# Altium schematic symbol library Centralize.SchLib: 1081 symbols (part 3 of 26)
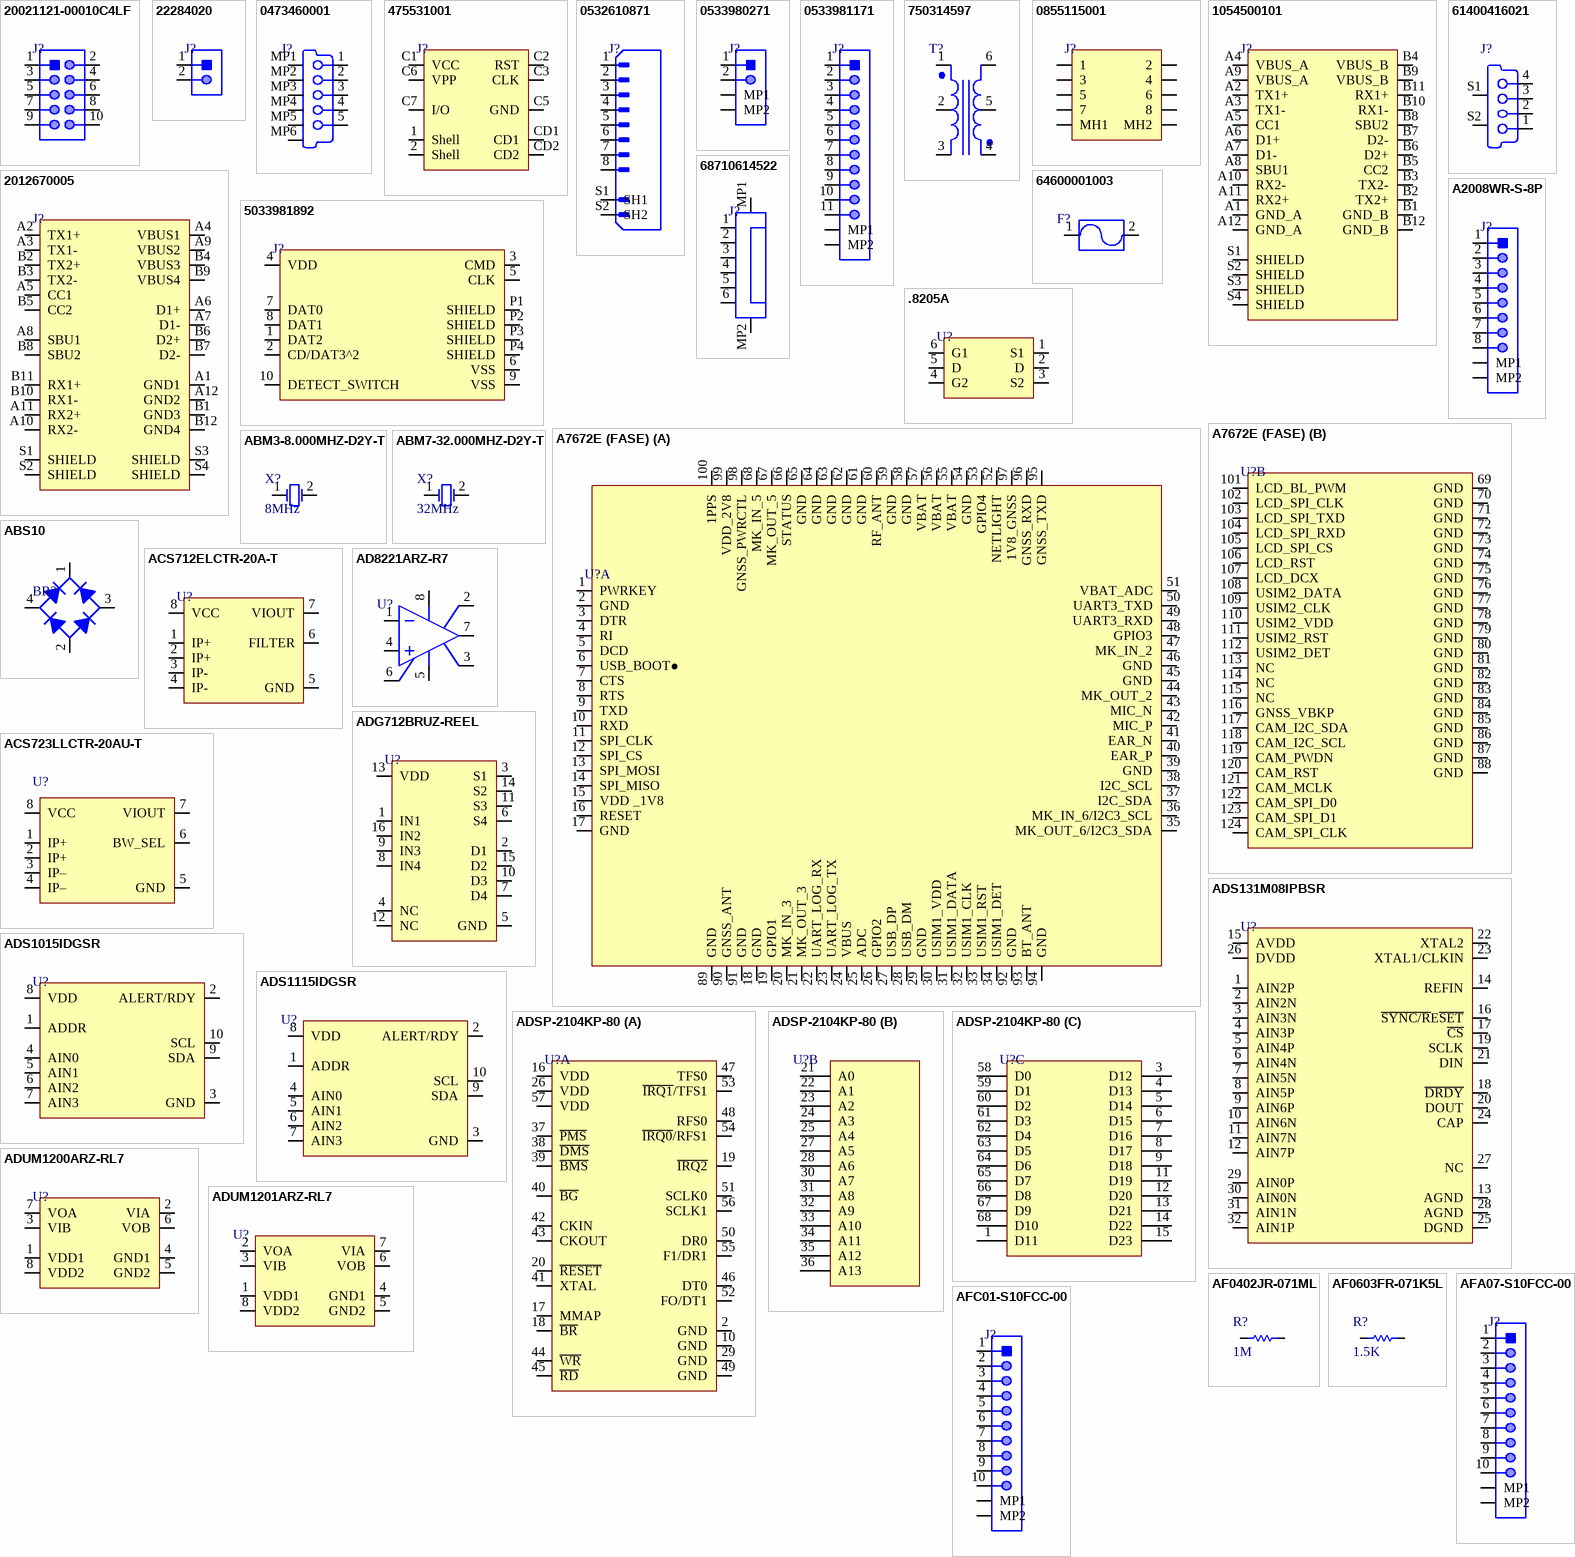
[diagram p49: symbols 20021121-00010C4LF to AFC01-S10FCC-00]

## 750314597
designator T?
XFRMR ISOL BUCK DC/DC CONV SMD; Manufacturer: Wurth Electronics Midcom; Manufacturer Part Number: 750314597; Frequency: 150kHz; Item Type: Transformer; Supplier 1: Digi-Key; RoHS: Yes; Category: Power Supply Modules; Stock 1: 1132; Pricing 1: 1=3.57000, 10=3.30600, 50=3.00500, 100=2.73200 (USD); Mount: Surface Mount; Min Operating Temperature: -40°C; Max Operating Temperature: 125°C; Packaging: Tape and Reel; RoHS Compliant: No; ComponentLink1URL: http://www.mouser.com/ds/2/445/750314597-773587.pdf?src-supplier=Mouser; ComponentLink1Description: http://www.mouser.com/ds/2/445/750314597-773587.pdf?src-supplier=Mouser; ComponentLink2URL: https://katalog.we-online.de/ctm/datasheet/750314597.pdf?src-supplier=Digi-Key; ComponentLink2Description: https://katalog.we-online.de/ctm/datasheet/750314597.pdf?src-supplier=Digi-Key; Supplier Part Number 1: 1297-1165-1-ND
footprint 750314597.
pins: 1 PRI_1, 2 NC, 3 PRI_2, 4 SEC_1, 5 NC, 6 SEC_2

## 0855115001
designator J?
CONN MOD JACK 8P8C VERT UNSHLD; Manufacturer: Molex; Manufacturer Part Number: 85511-5001; Number of Ports: 1; Gender: Female; Current Rating: 1.5A; Shielding: Unshielded; Voltage Rating: 125V; Number of Contacts: 8; Connector Type: PCB; Pitch: 2.54mm; Item Type: Ethernet Connector; Supplier 1: Mouser; RoHS: Yes; Category: Modular / Ethernet Connectors; Stock 1: 2609; Pricing 1: 1=2.18, 10=1.62, 50=1.62, 100=1.56, 1000=1.37, 10000=1.36 (USD); Mounting Technology: Through Hole; Contact Plating: Gold; Contact Material: Bronze; Housing Material: Thermoplastic; Min Operating Temperature: -40°C; Max Operating Temperature: 80°C; Packaging: Tray; Orientation: Straight; Package Quantity: 2618; Termination: Through Hole; Number of Positions: 8; Series: 85511; Radiation Hardening: No; RoHS Compliant: Yes; Reach SVHC Compliant: Unknown; ComponentLink1URL: https://datasheet.ciiva.com/8042/1598510-8042692.pdf?src-supplier=Element14; ComponentLink1Description: https://datasheet.ciiva.com/8042/1598510-8042692.pdf?src-supplier=Element14; ComponentLink2URL: https://datasheet.ciiva.com/34305/0855115001-modular-jacks-plug-34305578.pdf?src-supplier=Onlinecomponents.com; ComponentLink2Description: https://datasheet.ciiva.com/34305/0855115001-modular-jacks-plug-34305578.pdf?src-supplier=Onlinecomponents.com; ComponentLink3URL: https://datasheet.ciiva.com/4562/0855115001-modular-jacks-plug-175812-4562506.pdf?src-supplier=Mouser; ComponentLink3Description: https://datasheet.ciiva.com/4562/0855115001-modular-jacks-plug-175812-4562506.pdf?src-supplier=Mouser; ComponentLink4URL: https://datasheet.ciiva.com/9392/0855115001-modular-jacks-plug-9392966.pdf?src-supplier=Avnet; ComponentLink4Description: https://datasheet.ciiva.com/9392/0855115001-modular-jacks-plug-9392966.pdf?src-supplier=Avnet; Supplier Part Number 1: 538-85511-5001
footprint 0855115001
pins: 1, 2, 3, 4, 5, 6, 7, 8, MH1, MH2

## 1054500101
designator J?
CONN RCP USB3.1 TYPEC 24P SMD RA; Manufacturer: Molex; Manufacturer Part Number: 105450-0101; Item Type: USB Connector; Supplier 1: Arrow Electronics; RoHS: Yes; Category: USB Connectors; Stock 1: 1720; Pricing 1: 1=2.36000, 10=1.98100, 25=1.94300, 100=1.88000, 250=1.81800, 500=1.75500, 1000=1.69300 (USD); ComponentLink1URL: http://www.farnell.com/datasheets/2801634.pdf?src-supplier=Farnell; ComponentLink1Description: http://www.farnell.com/datasheets/2801634.pdf?src-supplier=Farnell; ComponentLink2URL: http://www.farnell.com/datasheets/2672741.pdf?src-supplier=Newark; ComponentLink2Description: http://www.farnell.com/datasheets/2672741.pdf?src-supplier=Newark; ComponentLink3URL: https://www.molex.com/pdm_docs/ps/PS-105448-001.pdf?src-supplier=Digi-Key; ComponentLink3Description: https://www.molex.com/pdm_docs/ps/PS-105448-001.pdf?src-supplier=Digi-Key; ComponentLink4URL: https://www.molex.com/pdm_docs/sd/1054500101_sd.pdf?src-supplier=Digi-Key; ComponentLink4Description: https://www.molex.com/pdm_docs/sd/1054500101_sd.pdf?src-supplier=Digi-Key; ComponentLink5URL: http://www.literature.molex.com/SQLImages/kelmscott/Molex/PDF_Images/987651-4081.PDF?src-supplier=Avnet; ComponentLink5Description: http://www.literature.molex.com/SQLImages/kelmscott/Molex/PDF_Images/987651-4081.PDF?src-supplier=Avnet; ComponentLink6URL: http://www.farnell.com/datasheets/2801634.pdf?src-supplier=Newark; ComponentLink6Description: http://www.farnell.com/datasheets/2801634.pdf?src-supplier=Newark; ComponentLink7URL: http://www.farnell.com/datasheets/2801634.pdf?src-supplier=Element14; ComponentLink7Description: http://www.farnell.com/datasheets/2801634.pdf?src-supplier=Element14; ComponentLink8URL: http://www.farnell.com/datasheets/2015275.pdf?src-supplier=Element14; ComponentLink8Description: http://www.farnell.com/datasheets/2015275.pdf?src-supplier=Element14; Supplier Part Number 1: 105450-0101; LCSC Part Number: C134092
footprint 1054500101_
pins: A1 GND_A, A2 TX1+, A3 TX1-, A4 VBUS_A, A5 CC1, A6 D1+, A7 D1-, A8 SBU1, A9 VBUS_A, A10 RX2-, A11 RX2+, A12 GND_A, B1 GND_B, B2 TX2+, B3 TX2-, B4 VBUS_B, B5 CC2, B6 D2+, B7 D2-, B8 SBU2, B9 VBUS_B, B10 RX1-, B11 RX1+, B12 GND_B, S1 SHIELD, S2 SHIELD, S3 SHIELD, S4 SHIELD

## 2012670005
designator J?
CONN RCP USB3.1 TYPEC 24P SMD RA; Manufacturer: Molex; Manufacturer Part Number: 2012670005; Item Type: USB C Connector; Supplier 1: RSComponents; RoHS: Yes; Category: Uncategorized; Stock 1: 1525; Pricing 1: 50=2.06600, 125=1.93000, 250=1.81600, 500=1.70800 (GBP); ComponentLink1URL: https://www.molex.com/pdm_docs/sd/2012670005_sd.pdf?src-supplier=Digi-Key; ComponentLink1Description: https://www.molex.com/pdm_docs/sd/2012670005_sd.pdf?src-supplier=Digi-Key; Supplier Part Number 1: 1768676P; ComponentLink2Description: LCSC; ComponentLink2URL: https://www.lcsc.com/product-detail/USB-Connectors_MOLEX-2012670005_C565324.html; LCSC Part Number: C565324
footprint 2012670005
pins: A1 GND1 (power), A2 TX1+, A3 TX1-, A4 VBUS1 (power), A5 CC1, A6 D1+, A7 D1-, A8 SBU1, A9 VBUS2 (power), A10 RX2-, A11 RX2+, A12 GND2 (power), B1 GND3 (power), B2 TX2+, B3 TX2-, B4 VBUS3 (power), B5 CC2, B6 D2+, B7 D2-, B8 SBU2, B9 VBUS4 (power), B10 RX1-, B11 RX1+, B12 GND4 (power), S1 SHIELD (power), S2 SHIELD (power), S3 SHIELD (power), S4 SHIELD (power)

## 5033981892
designator J?
MICRO SD PUSH/PUSH SMALL 8C; Manufacturer: Molex; Manufacturer Part Number: 503398-1892; Item Type: SD Card Connector; Supplier 1: Arrow Electronics; RoHS: Yes; Category: Memory Connectors; Stock 1: 14535; Pricing 1: 1=2.47900, 10=2.18900, 25=2.17400, 100=1.81200 (USD); ComponentLink1URL: https://datasheet.ciiva.com/29723/5033981892-sd-29723401.pdf?src-supplier=Digi-Key; ComponentLink1Description: https://datasheet.ciiva.com/29723/5033981892-sd-29723401.pdf?src-supplier=Digi-Key; ComponentLink2URL: https://datasheet.ciiva.com/22744/1740946-22744573.pdf?src-supplier=Element14; ComponentLink2Description: https://datasheet.ciiva.com/22744/1740946-22744573.pdf?src-supplier=Element14; ComponentLink3URL: https://datasheet.ciiva.com/23941/1740947-23941665.pdf?src-supplier=Newark; ComponentLink3Description: https://datasheet.ciiva.com/23941/1740947-23941665.pdf?src-supplier=Newark; Supplier Part Number 1: 503398-1892; LCSC Part Number: C428492
footprint 5033981892_
pins: 1 DAT2, 2 CD/DAT3^2, 3 CMD, 4 VDD, 5 CLK, 6 VSS, 7 DAT0, 8 DAT1, 9 VSS, 10 DETECT_SWITCH, P1 SHIELD, P2 SHIELD, P3 SHIELD, P4 SHIELD

## 61400416021
designator J?
CONN RCPT USB2.0 TYPEA 4POS R/A; Manufacturer: Wurth Electronics; Manufacturer Part Number: 61400416021; Gender: Receptacle; Connector Type: USB; Number of Contacts: 4; Current Rating: 1A; Voltage Rating: 30V; Number of Ports: 1; Insulation Resistance: 1GR; Item Type: Connector; Supplier 1: Digi-Key; Stock 1: 7748; Pricing 1: 1=0.99, 10=0.874, 50=0.823, 100=0.739, 250=0.672 (USD); Mount: Through Hole,Horizontal; Contact Plating: Gold; Contact Material: Copper Alloy; Color: White; Min Operating Temperature: -40°C; Max Operating Temperature: 105°C; Packaging: Tray; Package Quantity: 60; Series: WR-COM; Number of Positions: 4; Termination: Solder; Orientation: Right Angle; USB Standard: USB 2.0; Length: 15.8mm; Width: 14.4mm; REACH SVHC: Unknown; Lead Free: Lead Free; Flammability Rating: UL94 V-0; ComponentLink1URL: https://www.distrelec.biz/Web/Downloads/he/et/4257096_eng_datasheet.pdf?mime=application%2Fpdf&src-supplier=Distrelec; ComponentLink1Description: https://www.distrelec.biz/Web/Downloads/he/et/4257096_eng_datasheet.pdf?mime=application%2Fpdf&src-supplier=Distrelec; ComponentLink2URL: http://www.farnell.com/datasheets/1712150.pdf?src-supplier=Element14; ComponentLink2Description: http://www.farnell.com/datasheets/1712150.pdf?src-supplier=Element14; ComponentLink3URL: http://www.farnell.com/datasheets/1712150.pdf?src-supplier=Newark; ComponentLink3Description: http://www.farnell.com/datasheets/1712150.pdf?src-supplier=Newark; ComponentLink4URL: http://katalog.we-online.de/kataloge/eican/media/pdf/61400416021.pdf?src-supplier=Mouser; ComponentLink4Description: http://katalog.we-online.de/kataloge/eican/media/pdf/61400416021.pdf?src-supplier=Mouser; ComponentLink5URL: https://katalog.we-online.de/em/datasheet/61400416021.pdf?src-supplier=Digi-Key; ComponentLink5Description: https://katalog.we-online.de/em/datasheet/61400416021.pdf?src-supplier=Digi-Key; ComponentLink6URL: http://documents.rs-components.com/techlib://itc_doclist_GB.htm?stockno=7480863&src-supplier=RSComponents; ComponentLink6Description: http://documents.rs-components.com/techlib://itc_doclist_GB.htm?stockno=7480863&src-supplier=RSComponents; ComponentLink7URL: http://www.produktinfo.conrad.com/datenblaetter/1000000-1099999/001088207-da-01-en-WR_COM_USB_TYP_A__61400416021.pdf?src-supplier=Conrad; ComponentLink7Description: http://www.produktinfo.conrad.com/datenblaetter/1000000-1099999/001088207-da-01-en-WR_COM_USB_TYP_A__61400416021.pdf?src-supplier=Conrad; Supplier Part Number 1: 732-2106-ND
footprint 61400416021_
pins: 1 V BUS (5V) "USB Vcc [Red]", 2 D- "USB Data - [White]", 3 D+ "USB Data + [Green]", 4 NC "Not Connected (or joined to pin 5 via resistor)", S1 Shield "Shell", S2 Shield "Shell"

## 64600001003
designator F?
FUSE BLOCK CART 250V 6.3A PCB; Manufacturer: Littelfuse Wickmann; Manufacturer Part Number: 64600001003; Color: Black; Material: Tin; Body Material: Polyamide; Number of Poles: 1; Illumination Type: Illuminated; Fuse Size: 0.197 Dia x 0.787 L (5mm x 20mm); Item Type: Fuse holder; Supplier 1: Future Electronics; RoHS: Yes; Category: Fuse Holders; Stock 1: 9600; Pricing 1: 100=0.45500, 400=0.43500, 1500=0.41500, 3000=0.41000, 7500=0.39000 (USD); Mount: Through Hole; Number of Pins: 2; Contact Material: Copper Alloy; Contact Plating: Tin; Min Operating Temperature: -25°C; Max Operating Temperature: 70°C; Voltage Rating (DC): 250V; Voltage Rating (AC): 250V; Current Rating: 6.3A; Package Quantity: 1000; Voltage Rating: 250V; Packaging: Bulk; Number of Circuits: 1; Termination: PC Pin; Voltage: 250V; Fuse Current: 6.3A; Series: 646; Orientation: Horizontal; Length: 25.8mm; Width: 12mm; Depth: 5.5mm; Lead Free: Lead Free; Flammability Rating: UL94 V-1; ComponentLink1URL: https://datasheet.ciiva.com/25620/0900766b81196eda-25620105.pdf?src-supplier=Rs; ComponentLink1Description: https://datasheet.ciiva.com/25620/0900766b81196eda-25620105.pdf?src-supplier=Rs; ComponentLink2URL: https://datasheet.ciiva.com/14119/gqlittelfuse-sicherungshalter-646-en-14119833.pdf?src-supplier=Distrelec; ComponentLink2Description: https://datasheet.ciiva.com/14119/gqlittelfuse-sicherungshalter-646-en-14119833.pdf?src-supplier=Distrelec; ComponentLink3URL: https://datasheet.ciiva.com/23593/43388-23593468.pdf?src-supplier=Newark; ComponentLink3Description: https://datasheet.ciiva.com/23593/43388-23593468.pdf?src-supplier=Newark; ComponentLink4URL: https://datasheet.ciiva.com/1270/1480080-1270114.pdf?src-supplier=Element14; ComponentLink4Description: https://datasheet.ciiva.com/1270/1480080-1270114.pdf?src-supplier=Element14; ComponentLink5URL: https://datasheet.ciiva.com/4480/646-648-640-lf-050901-4480295.pdf?src-supplier=Mouser; ComponentLink5Description: https://datasheet.ciiva.com/4480/646-648-640-lf-050901-4480295.pdf?src-supplier=Mouser; ComponentLink6URL: https://datasheet.ciiva.com/15187/getdatasheetpartid-57320-15187869.pdf?src-supplier=Verical; ComponentLink6Description: https://datasheet.ciiva.com/15187/getdatasheetpartid-57320-15187869.pdf?src-supplier=Verical; ComponentLink7URL: https://datasheet.ciiva.com/7660/646-648-640-lf-050901-7660727.pdf?src-supplier=Element14; ComponentLink7Description: https://datasheet.ciiva.com/7660/646-648-640-lf-050901-7660727.pdf?src-supplier=Element14; ComponentLink8URL: https://datasheet.ciiva.com/295/646-648-640-lf-050901-295754.pdf?src-supplier=Digi-Key; ComponentLink8Description: https://datasheet.ciiva.com/295/646-648-640-lf-050901-295754.pdf?src-supplier=Digi-Key; LCSC Part Number: C206887; ComponentLink9Description: LCSC; ComponentLink9URL: https://www.lcsc.com/product-detail/Fuse-Holders_Littelfuse-64600001003_C206887.html
footprint 64600001003
pins: 1, 2

## 68710614522
designator J?
CONN FPC BOTTOM 6POS 0.5MM R/A; Manufacturer: Wurth Electronics; Manufacturer Part Number: 68710614522; Actuator Material: Polymer,Liquid Crystal Polymer; Actuator Color: Black; Current Rating: 500mA; Voltage Rating: 50V; Number of Positions: 6; Insulation Resistance: 100MR; Gender: Male; Mating Cycles: 25; Item Type: FPC Connector; Supplier 1: Rs; RoHS: Yes; Category: FFC / FPC; Stock 1: 375; Pricing 1: 50=0.14160, 250=0.65600, 500=0.57200, 1250=0.51800 (GBP); Mounting Technology: Surface Mount; Contact Plating: Tin; Contact Material: Bronze,Tin; Housing Material: Liquid Crystal Polymer; Housing Color: Beige; Min Operating Temperature: -25°C; Max Operating Temperature: 85°C; Number of Rows: 1; Package Quantity: 1; Packaging: Tape and Reel; Termination: SMD/SMT; Contact Location: Bottom; Number of Contacts: 6; Orientation: Straight; Series: WR-FPC; Length: 9.4mm; Width: 2.1mm; Pitch: 0.5mm; Flammability Rating: UL94 V-0; RoHS Compliant: Yes; ComponentLink1URL: https://datasheet.ciiva.com/7662/6871xx14522-7662619.pdf?src-supplier=Element14; ComponentLink1Description: https://datasheet.ciiva.com/7662/6871xx14522-7662619.pdf?src-supplier=Element14; ComponentLink2URL: https://datasheet.ciiva.com/13698/6871xx14522-321403-13698860.pdf?src-supplier=Mouser; ComponentLink2Description: https://datasheet.ciiva.com/13698/6871xx14522-321403-13698860.pdf?src-supplier=Mouser; ComponentLink3URL: https://datasheet.ciiva.com/670/6871xx14522-670518.pdf?src-supplier=Digi-Key; ComponentLink3Description: https://datasheet.ciiva.com/670/6871xx14522-670518.pdf?src-supplier=Digi-Key; ComponentLink4URL: https://datasheet.ciiva.com/670/6871xx14522-670517.pdf?src-supplier=Digi-Key; ComponentLink4Description: https://datasheet.ciiva.com/670/6871xx14522-670517.pdf?src-supplier=Digi-Key; ComponentLink5URL: https://datasheet.ciiva.com/670/6871xx14522-670519.pdf?src-supplier=Digi-Key; ComponentLink5Description: https://datasheet.ciiva.com/670/6871xx14522-670519.pdf?src-supplier=Digi-Key; ComponentLink6URL: https://datasheet.ciiva.com/14153/6871xx14522-eng-datasheet-14153885.pdf?src-supplier=Distrelec; ComponentLink6Description: https://datasheet.ciiva.com/14153/6871xx14522-eng-datasheet-14153885.pdf?src-supplier=Distrelec; Supplier Part Number 1: 7632613P
footprint 68710614522
pins: 1, 2, 3, 4, 5, 6, MP1, MP2

## .8205A
designator U?
20V 6A 22mΩ@4.5V,4.5A 2W 2PCSNChannel(Common Drain) SOT-23-6 MOSFETs ROHS; Manufacturer: Shenzhen Fuman Elec; Manufacturer Part Number: .8205A; Item Type: IC; ComponentLink1Description: LCSC; ComponentLink1URL: https://www.lcsc.com/product-detail/MOSFETs_Shenzhen-Fuman-Elec-8205A_C841290.html; Package: SOT-23-6; LCSC Part Number: C841290
footprint SOT-23-6
pins: 1 S1, 2 D, 3 S2, 4 G2, 5 D, 6 G1

## A2008WR-S-8P
designator J?
1x8P PH 1 2mm 8 Brass SMD,P=2mm Wire To Board / Wire To Wire Connector ROHS; Manufacturer: CJT; Manufacturer Part Number: A2008WR-S-8P; Package: SMD,P=2mm; LCSC Part Number: C273136; Item Type: Wire To Wire Connector; ComponentLink1Description: LCSC; ComponentLink1URL: https://www.lcsc.com/product-detail/_Changjiang-Connectors-A2008WR-S-8P_C273136.html
footprint A2008WR-S-8P
pins: 1, 2, 3, 4, 5, 6, 7, 8, MP1, MP2

## A7672E (FASE)
designator U?
RF TXRX MODULE CELLULAR SMD; Manufacturer: SIMCom Wireless Solutions Limited; Manufacturer Part Number: A7672E (FASE); Item Type: IC Module; Package: 80-SMD Module; ComponentLink1Description: Digikey; ComponentLink1URL: https://www.digikey.com/en/products/detail/simcom-wireless-solutions-limited/A7672E-FASE/15841437
footprint A7672E (FASE)
part A pins: 1 PWRKEY, 2 GND, 3 DTR, 4 RI, 5 DCD, 6 USB_BOOT●, 7 CTS, 8 RTS, 9 TXD, 10 RXD, 11 SPI_CLK, 12 SPI_CS, 13 SPI_MOSI, 14 SPI_MISO, 15 VDD _1V8, 16 RESET, 17 GND, 18 GND, 19 GPIO1, 20 MK_IN_3, 21 MK_OUT_3, 22 UART_LOG_RX, 23 UART_LOG_TX, 24 VBUS, 25 ADC, 26 GPIO2, 27 USB_DP, 28 USB_DM, 29 GND, 30 USIM1_VDD, 31 USIM1_DATA, 32 USIM1_CLK, 33 USIM1_RST, 34 USIM1_DET, 35 MK_OUT_6/I2C3_SDA, 36 MK_IN_6/I2C3_SCL, 37 I2C_SDA, 38 I2C_SCL, 39 GND, 40 EAR_P, 41 EAR_N, 42 MIC_P, 43 MIC_N, 44 MK_OUT_2, 45 GND, 46 GND, 47 MK_IN_2, 48 GPIO3, 49 UART3_RXD, 50 UART3_TXD, 51 VBAT_ADC, 52 NETLIGHT, 53 GPIO4, 54 GND, 55 VBAT, 56 VBAT, 57 VBAT, 58 GND, 59 GND, 60 RF_ANT, 61 GND, 62 GND, 63 GND, 64 GND, 65 GND, 66 STATUS, 67 MK_OUT_5, 68 MK_IN_5, 89 GND, 90 GNSS_ANT, 91 GND, 92 GND, 93 BT_ANT, 94 GND, 95 GNSS_TXD, 96 GNSS_RXD, 97 1V8_GNSS, 98 GNSS_PWRCTL, 99 VDD_2V8, 100 1PPS
part B pins: 69 GND, 70 GND, 71 GND, 72 GND, 73 GND, 74 GND, 75 GND, 76 GND, 77 GND, 78 GND, 79 GND, 80 GND, 81 GND, 82 GND, 83 GND, 84 GND, 85 GND, 86 GND, 87 GND, 88 GND, 101 LCD_BL_PWM, 102 LCD_SPI_CLK, 103 LCD_SPI_TXD, 104 LCD_SPI_RXD, 105 LCD_SPI_CS, 106 LCD_RST, 107 LCD_DCX, 108 USIM2_DATA, 109 USIM2_CLK, 110 USIM2_VDD, 111 USIM2_RST, 112 USIM2_DET, 113 NC, 114 NC, 115 NC, 116 GNSS_VBKP, 117 CAM_I2C_SDA, 118 CAM_I2C_SCL, 119 CAM_PWDN, 120 CAM_RST, 121 CAM_MCLK, 122 CAM_SPI_D0, 123 CAM_SPI_D1, 124 CAM_SPI_CLK

## ABM3-8.000MHZ-D2Y-T
designator X?, comment 8MHz
5032 2-SMD 8MHz 18pF ±20ppm -40°C~85°C; Manufacturer: Abracon; Manufacturer Part Number: ABM3-8.000MHZ-D2Y-T; ESR (Equivalent Series Resistance): 140R; Frequency Stability: 30ppm; ESR: 500R; Item Type: Crystal; Supplier 1: Future Electronics; RoHS: Yes; Category: Crystals; Stock 1: 294000; Pricing 1: 1000=0.36500, 2000=0.35500, 3000=0.35000, 4000=0.34500, 5000=0.33500 (USD); Mounting Technology: Surface Mount; Case/Package: SMD/SMT; Pins: 2; Min Operating Temperature: -40°C; Max Operating Temperature: 85°C; Frequency: 8MHz; Tolerance: 20ppm; Load Capacitance: 18pF; Packaging: Cut Tape; Package Quantity: 1000; Frequency Tolerance: 20ppm; Termination: SMD/SMT; Resistor Type: Ceramic; Series: ABM3; Length: 5mm; Width: 3.2mm; Height: 0.051inch; Depth: 3.2mm; Radiation Hardening: No; Lead Free: Lead Free; RoHS Compliant: Yes; ComponentLink1URL: https://datasheet.ciiva.com/862/abm3-862465.pdf?src-supplier=Digi-Key; ComponentLink1Description: https://datasheet.ciiva.com/862/abm3-862465.pdf?src-supplier=Digi-Key; Supplier Part Number 1: 9005104; LCSC Part Number: C144380
footprint SMD5032-2P
pins: 1 OSC1, 2 OSC2

## ABM7-32.000MHZ-D2Y-T
designator X?, comment 32MHz
CRYSTAL 32.0000MHZ 18PF SMD; Manufacturer: Abracon; Manufacturer Part Number: ABM7-32.000MHZ-D2Y-T; ESR (Equivalent Series Resistance): 50R; Tolerance: 20ppm; Frequency Stability: 30ppm; Supplier 1: Mouser; RoHS: Yes; Category: Crystals; Stock 1: 966; Pricing 1: 1=0.87000, 10=0.77300, 50=0.77300, 100=0.63900, 1000=0.50300, 10000=0.50300 (USD); Mounting Technology: Surface Mount; Case/Package: CSMD; Pins: 2; Min Operating Temperature: -40°C; Max Operating Temperature: 85°C; Frequency: 32MHz; Load Capacitance: 18pF; Package Quantity: 1; Packaging: Tape and Reel; Frequency Tolerance: 20ppm; Termination: SMD/SMT; Resistor Type: Ceramic; ESR: 50R; Series: ABM7; Operating Frequency: 32 MHz; Length: 6mm; Width: 0.138inch; Height: 0.055inch; Depth: 3.5mm; Radiation Hardening: No; Lead Free: Lead Free; ComponentLink1URL: https://datasheet.ciiva.com/18649/abm7-18649657.pdf?src-supplier=Digi-Key; ComponentLink1Description: https://datasheet.ciiva.com/18649/abm7-18649657.pdf?src-supplier=Digi-Key; ComponentLink2URL: https://datasheet.ciiva.com/18649/abm7-18649658.pdf?src-supplier=Digi-Key; ComponentLink2Description: https://datasheet.ciiva.com/18649/abm7-18649658.pdf?src-supplier=Digi-Key; ComponentLink3URL: https://datasheet.ciiva.com/18649/abm7-18649659.pdf?src-supplier=Digi-Key; ComponentLink3Description: https://datasheet.ciiva.com/18649/abm7-18649659.pdf?src-supplier=Digi-Key; ComponentLink4URL: https://datasheet.ciiva.com/3175/abm7-3175950.pdf?src-supplier=Avnet; ComponentLink4Description: https://datasheet.ciiva.com/3175/abm7-3175950.pdf?src-supplier=Avnet; ComponentLink5URL: https://datasheet.ciiva.com/28624/947971-28624821.pdf?src-supplier=Element14; ComponentLink5Description: https://datasheet.ciiva.com/28624/947971-28624821.pdf?src-supplier=Element14; ComponentLink6URL: https://datasheet.ciiva.com/16416/abm7-16416937.pdf?src-supplier=Future+Electronics; ComponentLink6Description: https://datasheet.ciiva.com/16416/abm7-16416937.pdf?src-supplier=Future+Electronics; ComponentLink7URL: https://datasheet.ciiva.com/3175/abm7-3175949.pdf?src-supplier=Avnet; ComponentLink7Description: https://datasheet.ciiva.com/3175/abm7-3175949.pdf?src-supplier=Avnet; Supplier Part Number 1: 815-ABM7-32-D2Y-T; LCSC Part Number: C1986810; Item Type: Crystal
footprint SMD6035-2P
pins: 1 OSC1, 2 OSC2

## ABS10
designator BR?
5uA@1kV 1V@0.4A 1A 1kV -55℃~+150℃@(Tj) ABS Bridge Rectifiers ROHS; Manufacturer: FOSAN; Manufacturer Part Number: ABS10; Package: ABS; Item Type: Bridge Rectifier; LCSC Part Number: C3014049; ComponentLink1Description: LCSC; ComponentLink1URL: https://www.lcsc.com/product-detail/Bridge-Rectifiers_FOSAN-ABS10_C3014049.html
footprint ABS
pins: 1, 2, 3, 4

## ACS712ELCTR-20A-T
designator U?
SENSOR CURRENT HALL 20A AC/DC; Manufacturer: Allegro MicroSystems, LLC; Manufacturer Part Number: ACS712ELCTR-20A-T; Item Type: IC; Package: SOIC-8; LCSC Part Number: C10681; ComponentLink5URL: https://www.lcsc.com/product-detail/Current-Sensors_Allegro-MicroSystems-LLC-ACS712ELCTR-20A-T_C10681.html; ComponentLink5Description: LCSC
footprint SOIC-8
pins: 1 IP+, 2 IP+, 3 IP-, 4 IP-, 5 GND, 6 FILTER, 7 VIOUT, 8 VCC

## ACS723LLCTR-20AU-T
designator U?
SENSOR CURRENT HALL 20A DC; Manufacturer: Allegro MicroSystems, LLC; Manufacturer Part Number: ACS723LLCTR-20AU-T; Item Type: IC; Package: SOP-8; LCSC Part Number: C459324; ComponentLink4URL: https://www.lcsc.com/product-detail/Current-Sensors_Allegro-MicroSystems-span-style-background-color-ff0-LLC-span-ACS723LLCTR-20AU-T_C459324.html; ComponentLink4Description: LCSC
footprint SOP-8
pins: 1 IP+, 2 IP+, 3 IP–, 4 IP–, 5 GND, 6 BW_SEL, 7 VIOUT, 8 VCC

## AD8221ARZ-R7
designator U?
IC OPAMP INSTR 825KHZ 8SOIC; Manufacturer: Analog Devices; Manufacturer Part Number: AD8221ARZ-R7; Number of Channels: 1; Common Mode Rejection Ratio: 80dB; Min Dual Supply Voltage: 2.3V; Max Dual Supply Voltage: 18V; Slew Rate: 2.5V/µs; Nominal Supply Current: 1mA; Max Power Dissipation: 200mW; Bandwidth: 562kHz; Input Bias Current: 1.5nA; Input Offset Voltage (Vos): 60uV; Output Current per Channel: 18mA; Power Supply Rejection Ratio (PSRR): 130dB; Voltage Gain: 60dB; Input Resistance: 100GR; Quiescent Current: 900uA; Operating Supply Voltage: 36V; Supplier 1: Mouser; RoHS: Yes; Category: Amplifiers - Op Amps, Buffer, Instrumentation; Pricing 1: 1=7.37000, 10=6.66000, 25=6.35000, 50=6.35000, 100=5.51000, 250=5.27000, 500=4.80000, 1000=4.37000, 10000=4.37000 (USD); Case/Package: SOIC; Number of Pins: 8; Contact Plating: Tin,Matte; Min Operating Temperature: -40°C; Max Operating Temperature: 85°C; -3db Bandwidth: 825kHz; Package Quantity: 1000; Packaging: Tape and Reel; Number of Circuits: 1; Operating Supply Current: 1mA; Number of Elements: 1; Power Dissipation: 200mW; Series: -; Supply Current: 1mA; Radiation Hardening: No; Lead Free: Contains Lead; RoHS Compliant: Yes; ComponentLink1URL: https://datasheet.ciiva.com/15128/getdatasheetpartid-313520-15128733.pdf?src-supplier=Verical; ComponentLink1Description: https://datasheet.ciiva.com/15128/getdatasheetpartid-313520-15128733.pdf?src-supplier=Verical; ComponentLink2URL: https://datasheet.ciiva.com/2975/ad8221-2975658.pdf?src-supplier=Avnet; ComponentLink2Description: https://datasheet.ciiva.com/2975/ad8221-2975658.pdf?src-supplier=Avnet; ComponentLink3URL: https://datasheet.ciiva.com/2975/ad8221-2975980.pdf?src-supplier=Avnet; ComponentLink3Description: https://datasheet.ciiva.com/2975/ad8221-2975980.pdf?src-supplier=Avnet; ComponentLink4URL: https://datasheet.ciiva.com/6628/ad8221-6628618.pdf?src-supplier=Digi-Key; ComponentLink4Description: https://datasheet.ciiva.com/6628/ad8221-6628618.pdf?src-supplier=Digi-Key; ComponentLink5URL: https://datasheet.ciiva.com/6628/ad8221-6628619.pdf?src-supplier=Digi-Key; ComponentLink5Description: https://datasheet.ciiva.com/6628/ad8221-6628619.pdf?src-supplier=Digi-Key; ComponentLink6URL: https://datasheet.ciiva.com/6628/ad8221-6628617.pdf?src-supplier=Digi-Key; ComponentLink6Description: https://datasheet.ciiva.com/6628/ad8221-6628617.pdf?src-supplier=Digi-Key; ComponentLink7URL: https://datasheet.ciiva.com/48709/001249009-da-01-en-ic-amp-inst-prec-ad8221arz-r7-soic-8-adi-48709526.pdf?src-supplier=Conrad; ComponentLink7Description: https://datasheet.ciiva.com/48709/001249009-da-01-en-ic-amp-inst-prec-ad8221arz-r7-soic-8-adi-48709526.pdf?src-supplier=Conrad; Supplier Part Number 1: 584-AD8221ARZ-R7; LCSC Part Number: C13342; Item Type: IC
footprint SOIC-8
pins: 1 IN-, 2 RG, 3 RG, 4 IN+, 5 V- (power), 6 REF, 7 VOUT, 8 V+ (power)

## ADG712BRUZ-REEL
designator U?
IC SWITCH QUAD SPST 16TSSOP; Manufacturer: Analog Devices; Manufacturer Part Number: ADG712BRUZ-REEL; Max Supply Voltage: 5.5V; Min Supply Voltage: 1.8V; Number of Inputs: 4; Max Power Dissipation: 5uW; On-State Resistance: 4R; -3db Bandwidth: 200MHz; Max Supply Current: 1uA; Turn-On Delay Time: 11ns; Turn-Off Delay Time: 6ns; Operating Supply Current: 1nA; Power Dissipation: 430mW; Supply Type: Single; Polarity: Non-Inverting; High Level Output Current: 30mA; Interface: Parallel; Supplier 1: Digi-Key; Stock 1: 4085; Pricing 1: 1=2.89, 10=2.598, 25=2.4564, 100=2.129, 250=2.01984, 500=1.81238, 1000=1.52852 (USD); Mount: Surface Mount; Case/Package: TSSOP; Number of Pins: 16; Contact Plating: Tin,Matte; Min Operating Temperature: -40°C; Max Operating Temperature: 85°C; Number of Outputs: 4; Number of Channels: 4; Packaging: Tape and Reel; Package Quantity: 1; Number of Circuits: 4; Throw Configuration: SPST; Number of Bits: 4; Bandwidth: 200MHz; Lead Free: Contains Lead; ComponentLink1URL: http://www.analog.com/media/en/technical-documentation/data-sheets/ADG711_712_713.pdf?src-supplier=Digi-Key; ComponentLink1Description: http://www.analog.com/media/en/technical-documentation/data-sheets/ADG711_712_713.pdf?src-supplier=Digi-Key; ComponentLink2URL: http://datasheet.iiic.cc/analog_devices/ADG712BRUZ-REEL.pdf?src-supplier=IIIC; ComponentLink2Description: http://datasheet.iiic.cc/analog_devices/ADG712BRUZ-REEL.pdf?src-supplier=IIIC; Supplier Part Number 1: ADG712BRUZ-REELCT-ND; LCSC Part Number: C207505; Item Type: IC
footprint 16-TSSOP (0.173", 4.40mm Width)
pins: 1 IN1, 2 D1, 3 S1, 4 NC, 5 GND, 6 S4, 7 D4, 8 IN4, 9 IN3, 10 D3, 11 S3, 12 NC, 13 VDD, 14 S2, 15 D2, 16 IN2

## ADS131M08IPBSR
designator U?
IC ADC 24BIT SIGMA-DELTA 32TQFP; Manufacturer: Texas Instruments; Manufacturer Part Number: ADS131M08IPBSR; Supplier 1: Mouser; RoHS: Yes; Category: Analog to Digital Converters (ADCs); Pricing 1: 1=8.85000, 10=7.99000, 50=7.62000, 100=6.62000, 1000=5.39000, 10000=5.39000 (USD); Supplier Part Number 1: 595-ADS131M08IPBSR; LCSC Part Number: C2862610; Item Type: IC
footprint 32-TQFP (5x5)
pins: 1 AIN2P, 2 AIN2N, 3 AIN3N, 4 AIN3P, 5 AIN4P, 6 AIN4N, 7 AIN5N, 8 AIN5P, 9 AIN6P, 10 AIN6N, 11 AIN7N, 12 AIN7P, 13 AGND, 14 REFIN, 15 AVDD, 16 ~{SYNC/R}E~{SET}, 17 ~{CS}, 18 ~{DRDY}, 19 SCLK, 20 DOUT, 21 DIN, 22 XTAL2, 23 XTAL1/CLKIN, 24 CAP, 25 DGND, 26 DVDD, 27 NC, 28 AGND, 29 AIN0P, 30 AIN0N, 31 AIN1N, 32 AIN1P

## ADS1015IDGSR
designator U?
IC ADC 12BIT SIGMA-DELTA 10VSSOP; Manufacturer: Texas Instruments; Manufacturer Part Number: ADS1015IDGSR; Operating Supply Voltage: 3.3V; Min Supply Voltage: 2V; Max Supply Voltage: 5.5V; Interface: I2C; Number of Converters: 1; Resolution: 12b; Number of Bits: 12; Sampling Rate: 3.3KS/s; Polarity: Bipolar; Integral Nonlinearity (INL): 0.5LSB; Supply Type: Single; Number of Inputs: 4; Power Dissipation: 900uW; Supplier 1: Digi-Key; RoHS: Yes; Category: Analog to Digital Converters (ADCs); Pricing 1: 1=3.09000, 10=2.77500, 25=2.62360, 100=2.27370, 250=2.15712, 500=1.93556, 1000=1.65000 (USD); Case/Package: VSSOP; Number of Pins: 10; Contact Plating: Gold; Min Operating Temperature: -40°C; Max Operating Temperature: 125°C; Packaging: Tape and Reel; Package Quantity: 2500; Number of A/D Converters: 1; Number of Elements: 1; Conversion Rate: 3.3KS/s; Max Supply Voltage (DC): 5.5V; Min Supply Voltage (DC): 2V; Series: -; Radiation Hardening: No; Reach SVHC Compliant: Yes; Lead Free: Lead Free; RoHS Compliant: Yes; ComponentLink1URL: https://datasheet.ciiva.com/14260/sbas473c-14260076.pdf?src-supplier=Avnet; ComponentLink1Description: https://datasheet.ciiva.com/14260/sbas473c-14260076.pdf?src-supplier=Avnet; ComponentLink2URL: https://datasheet.ciiva.com/6662/ads1013-6662716.pdf?src-supplier=Digi-Key; ComponentLink2Description: https://datasheet.ciiva.com/6662/ads1013-6662716.pdf?src-supplier=Digi-Key; Supplier Part Number 1: 296-41185-1-ND; LCSC Part Number: C193969; Item Type: IC
footprint VSSOP-10
pins: 1 ADDR, 2 ALERT/RDY, 3 GND, 4 AIN0, 5 AIN1, 6 AIN2, 7 AIN3, 8 VDD, 9 SDA, 10 SCL

## ADS1115IDGSR
designator U?
IC ADC 16BIT SIGMA-DELTA 10VSSOP; Manufacturer: Texas Instruments; Manufacturer Part Number: ADS1115IDGSR; Interface: I2C; Number of Bits: 16; Sampling Rate: 860S/s; Number of A/D Converters: 1; Resolution: 16b; Polarity: Bipolar; Min Supply Voltage: 2V; Max Supply Voltage: 5.5V; Supply Type: Single; Conversion Rate: 0.86KS/s; Number of Inputs: 4; Integral Nonlinearity (INL): 1LSB; Power Dissipation: 900uW; Supplier 1: Digi-Key; Stock 1: 0; Pricing 1: 1=5.62, 10=5.046, 25=4.77, 100=4.134, 250=3.922, 500=3.5192, 1000=3.34 (USD); Case/Package: VSSOP; Number of Pins: 10; Contact Plating: Gold; Min Operating Temperature: -40°C; Max Operating Temperature: 125°C; Package Quantity: 2500; Packaging: Tape and Reel; Number of Converters: 1; Max Supply Voltage (DC): 5.5V; Min Supply Voltage (DC): 2V; Series: -; Radiation Hardening: No; REACH SVHC: No SVHC; Lead Free: Lead Free; RoHS Compliant: Yes; ComponentLink1URL: http://components.arrow.com/part/dataview/47725463S8438921N7713?src-supplier=Arrow+Electronics; ComponentLink1Description: http://components.arrow.com/part/dataview/47725463S8438921N7713?src-supplier=Arrow+Electronics; ComponentLink2URL: http://www.ti.com/lit/ds/sbas444b/sbas444b.pdf?src-supplier=Avnet+Europe; ComponentLink2Description: http://www.ti.com/lit/ds/sbas444b/sbas444b.pdf?src-supplier=Avnet+Europe; ComponentLink3URL: http://www.ti.com/lit/ds/symlink/ads1113.pdf?src-supplier=Digi-Key; ComponentLink3Description: http://www.ti.com/lit/ds/symlink/ads1113.pdf?src-supplier=Digi-Key; Supplier Part Number 1: 296-38849-1-ND; Item Type: IC
footprint VSSOP-10
pins: 1 ADDR, 2 ALERT/RDY, 3 GND, 4 AIN0, 5 AIN1, 6 AIN2, 7 AIN3, 8 VDD, 9 SDA, 10 SCL

## ADSP-2104KP-80
designator U?
Signal Processor, 16 Bit, 68 Pin, Plastic, PLCC; Manufacturer: Analog Devices; Manufacturer Part Number: ADSP-2104KP-80; Frequency: 20MHz; Item Type: IC; Supplier 1: Arrow Electronics; RoHS: No; Category: DSPs - Digital Signal Processors; Case/Package: PLCC; RoHS Compliant: No; ComponentLink1URL: http://components.arrow.com/part/dataview/57942S6127085N2771?src-supplier=Arrow+Electronics; ComponentLink1Description: http://components.arrow.com/part/dataview/57942S6127085N2771?src-supplier=Arrow+Electronics; Supplier Part Number 1: ADSP-2104KP-80; LCSC Part Number: C3588165
footprint 68-LCC (J-Lead)_
part A pins: 2 GND, 10 GND, 16 VDD, 17 MMAP, 18 ~{BR}, 19 ~{IRQ2}, 20 ~{RESET}, 26 VDD, 29 GND, 37 ~{PMS}, 38 ~{DMS}, 39 ~{BMS}, 40 ~{BG}, 41 XTAL, 42 CKIN, 43 CKOUT, 44 ~{WR}, 45 ~{RD}, 46 DT0, 47 TFS0, 48 RFS0, 49 GND, 50 DR0, 51 SCLK0, 52 FO/DT1, 53 ~{IRQ1}/TFS1, 54 ~{IRQ0}/RFS1, 55 F1/DR1, 56 SCLK1, 57 VDD
part B pins: 21 A0, 22 A1, 23 A2, 24 A3, 25 A4, 27 A5, 28 A6, 30 A7, 31 A8, 32 A9, 33 A10, 34 A11, 35 A12, 36 A13
part C pins: 1 D11, 3 D12, 4 D13, 5 D14, 6 D15, 7 D16, 8 D17, 9 D18, 11 D19, 12 D20, 13 D21, 14 D22, 15 D23, 58 D0, 59 D1, 60 D2, 61 D3, 62 D4, 63 D5, 64 D6, 65 D7, 66 D8, 67 D9, 68 D10

## ADUM1200ARZ-RL7
designator U?
DGTL ISO 2.5KV GEN PURP 8SOIC; Manufacturer: Analog Devices; Manufacturer Part Number: ADUM1200ARZ-RL7; Number of Channels: 2; Propagation Delay: 150ns; Min Supply Voltage: 2.7V; Operating Supply Voltage: 3.3V; Max Supply Voltage: 5.5V; Data Rate: 25Mbps; Channel Type: Unidirectional; Output Current: 35mA; Isolated Power: No; Pulse Width Distortion (PWD): 40ns; Supply Current: 600uA; Item Type: IC; Supplier 1: Arrow Electronics; RoHS: Yes; Category: Interface ICs; Stock 1: 14777; Pricing 1: 1=3.887, 10=3.493, 25=3.295, 100=2.865, 250=2.706, 500=2.425, 1000=2.066, 3000=2.048, 6000=2.025 (USD); Case/Package: R; Pins: 8; Min Operating Temperature: -40°C; Max Operating Temperature: 125°C; Packaging: Tape and Reel; Package Quantity: 1000; Turn-On Delay Time: 150ns; Type: General Purpose; Series: iCoupler®; Radiation Hardening: No; Lead Free: Contains Lead; RoHS Compliant: Yes; ComponentLink1URL: https://datasheet.ciiva.com/15119/getdatasheetpartid-258305-15119482.pdf?src-supplier=Verical; ComponentLink1Description: https://datasheet.ciiva.com/15119/getdatasheetpartid-258305-15119482.pdf?src-supplier=Verical; ComponentLink2URL: https://datasheet.ciiva.com/30514/1805054-30514023.pdf?src-supplier=Jameco; ComponentLink2Description: https://datasheet.ciiva.com/30514/1805054-30514023.pdf?src-supplier=Jameco; ComponentLink3URL: https://datasheet.ciiva.com/3148/adum1200-1201-3148342.pdf?src-supplier=Avnet; ComponentLink3Description: https://datasheet.ciiva.com/3148/adum1200-1201-3148342.pdf?src-supplier=Avnet; ComponentLink4URL: https://datasheet.ciiva.com/2081/adum1200-1201-2081796.pdf?src-supplier=Digi-Key; ComponentLink4Description: https://datasheet.ciiva.com/2081/adum1200-1201-2081796.pdf?src-supplier=Digi-Key; ComponentLink5URL: https://datasheet.ciiva.com/2081/adum1200-1201-2081797.pdf?src-supplier=Digi-Key; ComponentLink5Description: https://datasheet.ciiva.com/2081/adum1200-1201-2081797.pdf?src-supplier=Digi-Key; ComponentLink6URL: https://datasheet.ciiva.com/2081/adum1200-1201-2081795.pdf?src-supplier=Digi-Key; ComponentLink6Description: https://datasheet.ciiva.com/2081/adum1200-1201-2081795.pdf?src-supplier=Digi-Key; Supplier Part Number 1: ADUM1200ARZ-RL7; LCSC Part Number: C15219
footprint SOIC-8
pins: 1 VDD1 "Supply Voltage for Isolator Side 1.", 2 VIA "Logic Input A.", 3 VIB "Logic Input B.", 4 GND1 "Ground 1. Ground Reference for Isolator Side 1.", 5 GND2 "Ground 2. Ground Reference for Isolator Side 2.", 6 VOB "Logic Output B.", 7 VOA "Logic Output A.", 8 VDD2 "Supply Voltage for Isolator Side 2."

## ADUM1201ARZ-RL7
designator U?
DGTL ISO 2.5KV GEN PURP 8SOIC; Manufacturer: Analog Devices; Manufacturer Part Number: ADUM1201ARZ-RL7; Number of Channels: 2; Propagation Delay: 150ns; Min Supply Voltage: 2.7V; Max Supply Voltage: 5.5V; Data Rate: 25Mbps; Channel Type: Unidirectional; Polarity: Bidirectional; Operating Supply Current: 600uA; ESD Protection: No; Output Current: 35mA; Pulse Width Distortion (PWD): 40ns; Voltage: 5V; Approvals: UL,CSA,VDE; Item Type: IC; Supplier 1: Arrow Electronics; RoHS: Yes; Category: Interface ICs; Stock 1: 710; Pricing 1: 1=3.9521, 10=3.5429, 25=3.3533, 100=2.9042, 250=2.7545, 500=2.475, 1000=2.2037 (USD); Case/Package: R; Pins: 8; Weight: 0.019048oz; Min Operating Temperature: -40°C; Max Operating Temperature: 125°C; Packaging: Tape and Reel; Turn-On Delay Time: 150ns; Isolated Power: No; Type: General Purpose; Max Supply Current: 600uA; Series: iCoupler®; Radiation Hardening: No; Lead Free: Contains Lead; RoHS Compliant: Yes; ComponentLink1URL: https://datasheet.ciiva.com/15119/getdatasheetpartid-121048-15119389.pdf?src-supplier=Verical; ComponentLink1Description: https://datasheet.ciiva.com/15119/getdatasheetpartid-121048-15119389.pdf?src-supplier=Verical; ComponentLink2URL: https://datasheet.ciiva.com/15367/adum1200-1201-279454-15367752.pdf?src-supplier=Mouser; ComponentLink2Description: https://datasheet.ciiva.com/15367/adum1200-1201-279454-15367752.pdf?src-supplier=Mouser; ComponentLink3URL: https://datasheet.ciiva.com/3149/adum1200-1201-3149740.pdf?src-supplier=Avnet; ComponentLink3Description: https://datasheet.ciiva.com/3149/adum1200-1201-3149740.pdf?src-supplier=Avnet; ComponentLink4URL: https://datasheet.ciiva.com/3148/adum1200-1201-3148345.pdf?src-supplier=Avnet; ComponentLink4Description: https://datasheet.ciiva.com/3148/adum1200-1201-3148345.pdf?src-supplier=Avnet; ComponentLink5URL: https://datasheet.ciiva.com/2081/adum1200-1201-2081793.pdf?src-supplier=Digi-Key; ComponentLink5Description: https://datasheet.ciiva.com/2081/adum1200-1201-2081793.pdf?src-supplier=Digi-Key; ComponentLink6URL: https://datasheet.ciiva.com/2081/adum1200-1201-2081794.pdf?src-supplier=Digi-Key; ComponentLink6Description: https://datasheet.ciiva.com/2081/adum1200-1201-2081794.pdf?src-supplier=Digi-Key; ComponentLink7URL: https://datasheet.ciiva.com/2081/adum1200-1201-2081792.pdf?src-supplier=Digi-Key; ComponentLink7Description: https://datasheet.ciiva.com/2081/adum1200-1201-2081792.pdf?src-supplier=Digi-Key; Supplier Part Number 1: ADUM1201ARZ-RL7; LCSC Part Number: C9669
footprint SOIC-8
pins: 1 VDD1 "Supply Voltage for Isolator Side 1.", 2 VOA "Logic Output A.", 3 VIB "Logic Input B.", 4 GND1 "Ground 1. Ground Reference for Isolator Side 1.", 5 GND2 "Ground 2. Ground Reference for Isolator Side 2.", 6 VOB "Logic Output B.", 7 VIA "Logic Input A.", 8 VDD2 "Supply Voltage for Isolator Side 2."

## AF0402JR-071ML
designator R?, comment 1M
RES SMD 1M OHM 5% 1/16W 0402; Manufacturer: Yageo; Manufacturer Part Number: AF0402JR-071ML; Resistance: 1MR; Max Power Dissipation: 63mW; Temperature Coefficient: 100ppm/°C; Item Type: Resistor; Supplier 1: Digi-Key; Stock 1: 0; Pricing 1: 10000=0.00408 (USD); Case/Package: 0402; Min Operating Temperature: -55°C; Max Operating Temperature: 155°C; Packaging: Tape and Reel; Resistor Type: Thick Film; Number of Terminations: 2; Tolerance: 5%; Features: Moisture Resistant,Anti-Sulfur; Length: 0.039inch; Width: 0.02inch; Height: 0.015inch; RoHS Compliant: Yes; ComponentLink1URL: https://www.yageo.com/upload/media/product/productsearch/datasheet/rchip/PYu-AF_51_RoHS_L_6.pdf?src-supplier=Digi-Key; ComponentLink1Description: https://www.yageo.com/upload/media/product/productsearch/datasheet/rchip/PYu-AF_51_RoHS_L_6.pdf?src-supplier=Digi-Key; Supplier Part Number 1: AF0402JR-071ML-ND; LCSC Part Number: C144054
footprint Res-0402
pins: 1, 2

## AF0603FR-071K5L
designator R?, comment 1.5K
RES SMD 1.5K OHM 1% 1/10W 0603; Manufacturer: Yageo; Manufacturer Part Number: AF0603FR-071K5L; Resistance: 1.5kR; Max Power Dissipation: 100mW; Temperature Coefficient: 100ppm/°C; Item Type: Resistor; Supplier 1: Digi-Key; RoHS: Yes; Category: Chip SMD Resistors; Stock 1: 10444; Pricing 1: 1=0.10000, 10=0.05800, 100=0.02360, 1000=0.01061, 2500=0.00921 (USD); Case/Package: 0603; Min Operating Temperature: -55°C; Max Operating Temperature: 155°C; Packaging: Tape and Reel; Resistor Type: Thick Film; Number of Terminations: 2; Tolerance: 1%; Features: Moisture Resistant,Anti-Sulfur; Length: 0.063inch; Width: 0.031inch; Height: 0.022inch; RoHS Compliant: Yes; ComponentLink1URL: http://www.yageo.com/documents/recent/PYu-AF_51_RoHS_L_5.pdf?src-supplier=Digi-Key; ComponentLink1Description: http://www.yageo.com/documents/recent/PYu-AF_51_RoHS_L_5.pdf?src-supplier=Digi-Key; Supplier Part Number 1: 13-AF0603FR-071K5LCT-ND; LCSC Part Number: C144088
footprint Res-0603
footprint Res-0603
pins: 1, 2

## AFA07-S10FCC-00
designator J?
Slide Lock 10P Bottom Contact Surface Mount 1mm SMD,P=1mm FFC/FPC Connectors ROHS; Manufacturer: JUSHUO; Manufacturer Part Number: AFA07-S10FCC-00; Package: SMD,P=1mm; LCSC Part Number: C52162; Item Type: FFC/FPC Connector; ComponentLink1Description: LCSC; ComponentLink1URL: https://www.lcsc.com/product-detail/FFC-FPC-Connectors_JUSHUO-AFA07-S10FCC-00_C52162.html
footprint AFA07-S10FCC-00
pins: 1, 2, 3, 4, 5, 6, 7, 8, 9, 10, MP1, MP2

## AFC01-S10FCC-00
designator J?
Clamshell 10 Bottom Contact Surface Mount 0.5mm SMD,P=0.5mm FFC/FPC Connectors ROHS; Manufacturer: JUSHUO; Manufacturer Part Number: AFC01-S10FCC-00; Package: SMD,P=0.5mm; LCSC Part Number: C262266; Item Type: FPC Connector; ComponentLink1Description: LCSC; ComponentLink1URL: https://www.lcsc.com/product-detail/FFC-FPC-Connectors_JUSHUO-AFC01-S10FCC-00_C262266.html
footprint AFC01-S10FCC-00
pins: 1, 2, 3, 4, 5, 6, 7, 8, 9, 10, MP1, MP2

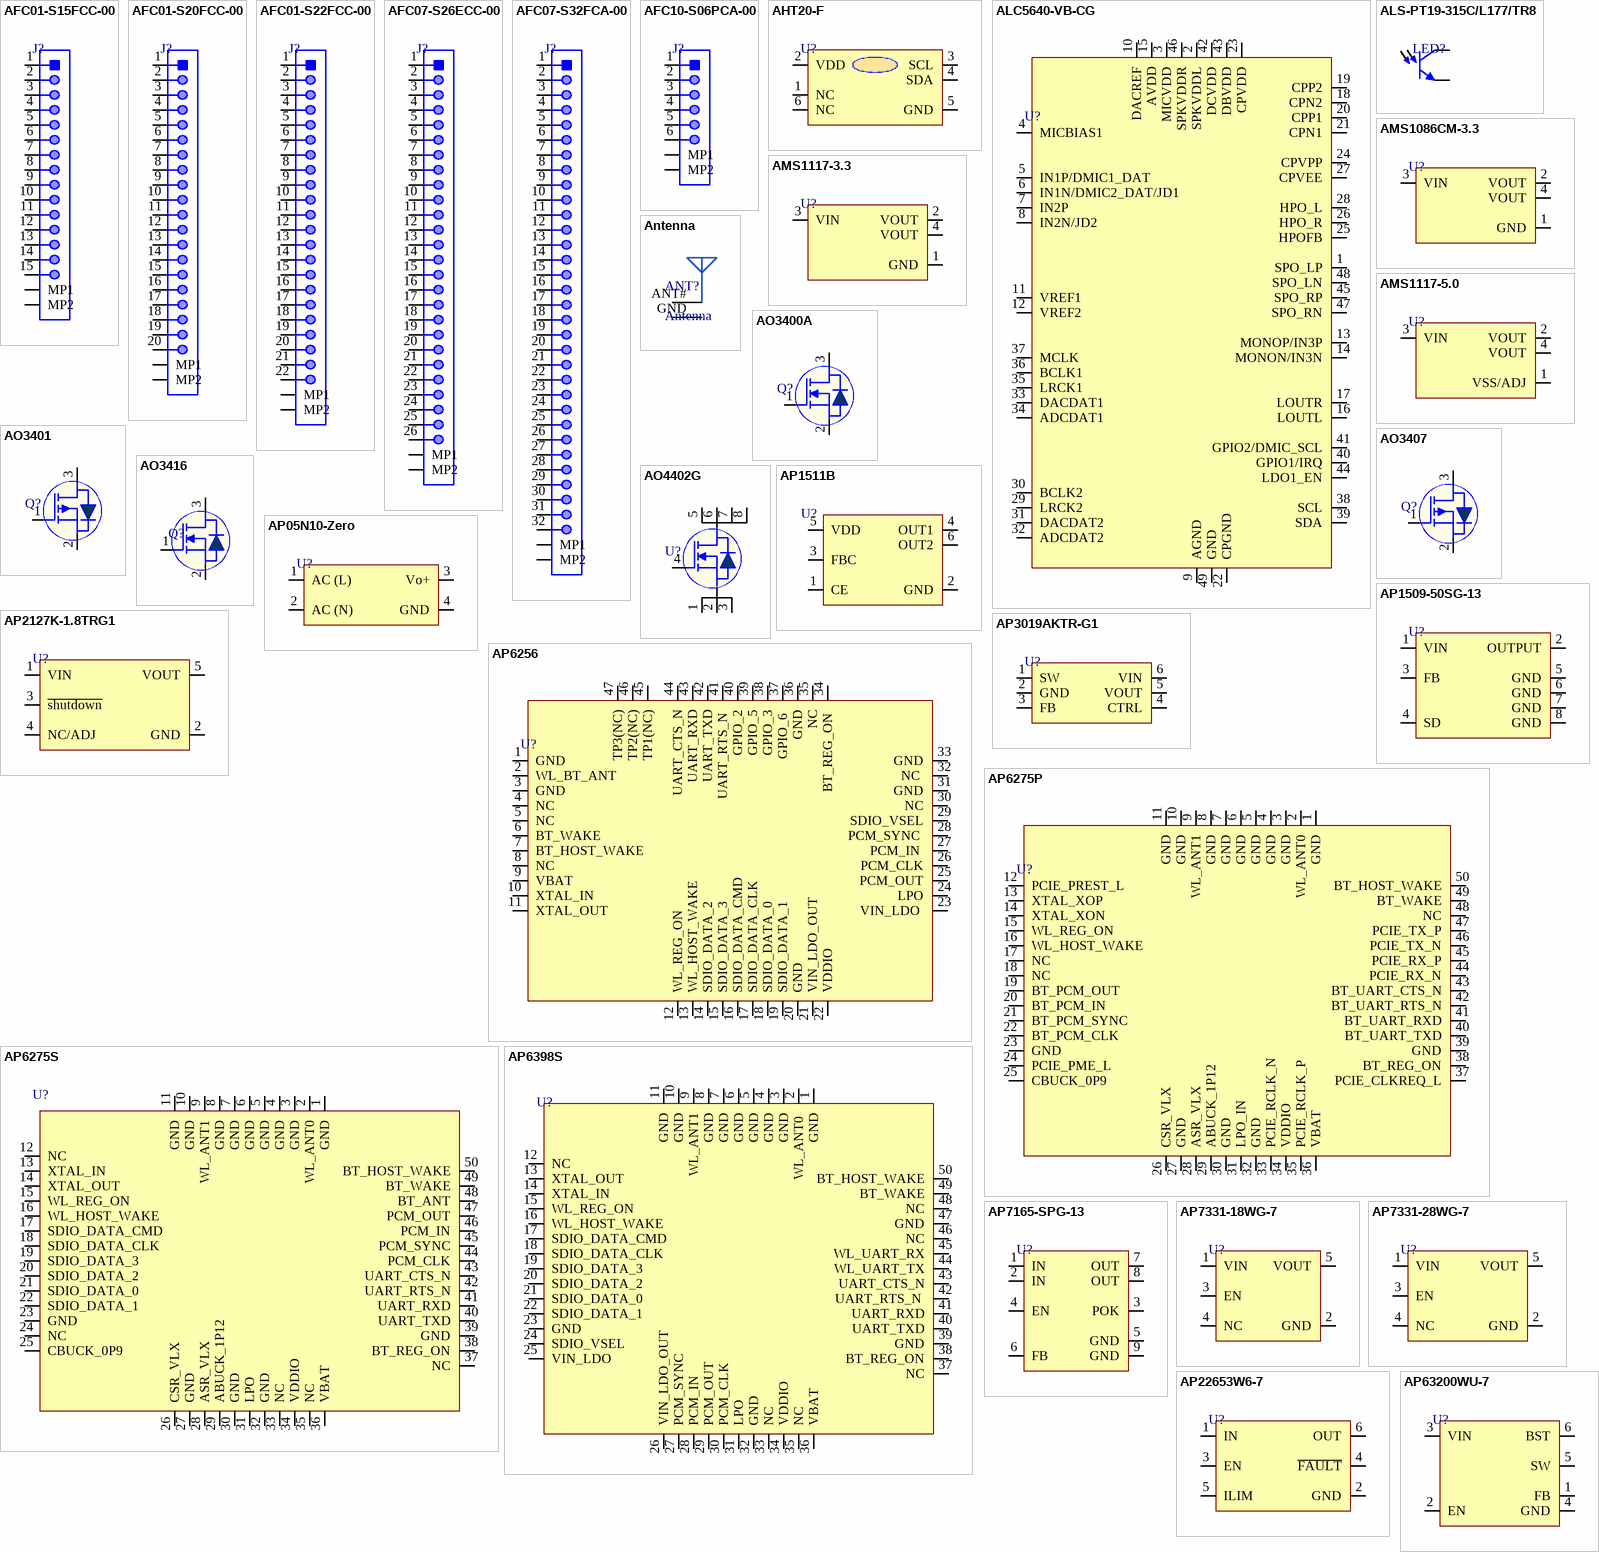
[diagram p3: symbols AFC01-S15FCC-00 to AP63200WU-7]

## AFC01-S15FCC-00
designator J?
Clamshell 15 Bottom Contact Surface Mount 0.5mm SMD,P=0.5mm FFC/FPC Connectors ROHS; Manufacturer: JUSHUO; Manufacturer Part Number: AFC01-S15FCC-00; Package: SMD,P=0.5mm; LCSC Part Number: C262271; Item Type: FPC Connector; ComponentLink1Description: LCSC; ComponentLink1URL: https://www.lcsc.com/product-detail/FFC-FPC-Connectors_JUSHUO-AFC01-S15FCC-00_C262271.html
footprint AFC01-S15FCC-00
pins: 1, 2, 3, 4, 5, 6, 7, 8, 9, 10, 11, 12, 13, 14, 15, MP1, MP2

## AFC01-S20FCC-00
designator J?
Clamshell 20P Bottom Contact Surface Mount 0.5mm SMD,P=0.5mm FFC/FPC Connectors ROHS; Manufacturer: JUSHUO; Manufacturer Part Number: AFC01-S20FCC-00; Package: SMD,P=0.5mm; LCSC Part Number: C262274; ComponentLink1Description: LCSC; ComponentLink1URL: https://www.lcsc.com/product-detail/FFC-FPC-Connectors_JUSHUO-AFC01-S20FCC-00_C262274.html; Item Type: FPC Connector
footprint AFC01-S20FCC-00
pins: 1, 2, 3, 4, 5, 6, 7, 8, 9, 10, 11, 12, 13, 14, 15, 16, 17, 18, 19, 20, MP1, MP2

## AFC01-S22FCC-00
designator J?
Clamshell 22P Bottom Contact Surface Mount 0.5mm SMD,P=0.5mm FFC/FPC Connectors ROHS; Manufacturer: JUSHUO; Manufacturer Part Number: AFC01-S22FCC-00; Package: SMD,P=0.5mm; LCSC Part Number: C262275; Item Type: FPC Connector; ComponentLink1Description: LCSC; ComponentLink1URL: https://www.lcsc.com/product-detail/FFC-FPC-Connectors_JUSHUO-AFC01-S22FCC-00_C262275.html
footprint AFC01-S22FCC-00
pins: 1, 2, 3, 4, 5, 6, 7, 8, 9, 10, 11, 12, 13, 14, 15, 16, 17, 18, 19, 20, 21, 22, MP1, MP2

## AFC07-S26ECC-00
designator J?
CONN FPC Slide Lock 26 Contact,Top Surface Mount 0.5mm; Manufacturer: JUSHUO; Manufacturer Part Number: AFC07-S26ECC-00; Number of Contacts: 26; FFC, FCB Thickness: 0.3mm~0.3mm; Item Type: FPC Connector; Height Above Board: 2mm; Contact Type: Contact,Top; Mounting Type: Surface Mount; Pitch: 0.5mm; LCSC Part Number: C11094; ComponentLink1Description: LCSC; ComponentLink1URL: https://lcsc.com/product-detail/FFC-FPC-Connectors_JUSHUO-AFC07-S26ECC-00_C11094.html
footprint AFC07-S26ECC-00_ (Slide Lock 26 Contact,Top Surface Mount 0.5mm SMD,P=0.5mm FFC/FPC Connectors ROHS)
pins: 1, 2, 3, 4, 5, 6, 7, 8, 9, 10, 11, 12, 13, 14, 15, 16, 17, 18, 19, 20, 21, 22, 23, 24, 25, 26, MP1, MP2

## AFC07-S32FCA-00
designator J?
Slide Lock 32 Bottom Contact Surface Mount 0.5mm SMD,P=0.5mm FFC/FPC Connectors ROHS; Manufacturer: JUSHUO; Manufacturer Part Number: AFC07-S32FCA-00; Footprint: Custom; ComponentLink1Description: LCSC; ComponentLink1URL: https://lcsc.com/product-detail/FFC-FPC-Connectors_JUSHUO-AFC07-S32FCA-00_C262570.html; LCSC Part Number: C262570; Item type: FPC Connector
footprint AFC07-S32FCA-00_
pins: 1, 2, 3, 4, 5, 6, 7, 8, 9, 10, 11, 12, 13, 14, 15, 16, 17, 18, 19, 20, 21, 22, 23, 24, 25, 26, 27, 28, 29, 30, 31, 32, MP1, MP2

## AFC10-S06PCA-00
designator J?
1x6P 1 1mm Male pin 6 -25℃~+85℃ 500mA Brick nogging SMD,P=1mm Wire To Board / Wire To Wire Connector ROHS; Manufacturer: JUSHUO; Manufacturer Part Number: AFC10-S06PCA-00; Package: SMD,P=1mm; ComponentLink1Description: LCSC; ComponentLink1URL: https://www.lcsc.com/product-detail/Wire-To-Board-Wire-To-Wire-Connector_JUSHUO-AFC10-S06PCA-00_C2764200.html; LCSC Part Number: C2764200; Item Type: Connector
footprint AFC10-S06PCA-00
pins: 1, 2, 3, 4, 5, 6, MP1, MP2

## AHT20-F
designator U?
SMD-6P,3x3mm Temperature and Humidity Sensor ROHS; Manufacturer: Aosong (Guangzhou) Elec; Manufacturer Part Number: AHT20-F; Item Type: IC; Package: SMD-6P,3x3mm; LCSC Part Number: C3012622; ComponentLink1Description: LCSC; ComponentLink1URL: https://www.lcsc.com/product-detail/Temperature-and-Humidity-Sensor_Aosong-Guangzhou-Elec-AHT20-F_C3012622.html
footprint AHT20-F
pins: 1 NC, 2 VDD, 3 SCL, 4 SDA, 5 GND, 6 NC

## ALC5640-VB-CG
designator U?
QFN-48 Audio Interface ICs ROHS; Manufacturer: Realtek Semicon; Manufacturer Part Number: ALC5640-VB-CG; Item Type: IC; Footprint: QFN-48; ComponentLink1Description: LCSC; ComponentLink1URL: https://www.lcsc.com/product-detail/Audio-Interface-ICs_Realtek-Semicon-ALC5640-VB-CG_C472491.html
footprint 48-QFN (6x6)_
pins: 1 SPO_LP, 2 SPKVDDL, 3 MICVDD, 4 MICBIAS1, 5 IN1P/DMIC1_DAT, 6 IN1N/DMIC2_DAT/JD1, 7 IN2P, 8 IN2N/JD2, 9 AGND, 10 DACREF, 11 VREF1, 12 VREF2, 13 MONOP/IN3P, 14 MONON/IN3N, 15 AVDD, 16 LOUTL, 17 LOUTR, 18 CPN2, 19 CPP2, 20 CPP1, 21 CPN1, 22 CPGND, 23 CPVDD, 24 CPVPP, 25 HPOFB, 26 HPO_R, 27 CPVEE, 28 HPO_L, 29 LRCK2, 30 BCLK2, 31 DACDAT2, 32 ADCDAT2, 33 DACDAT1, 34 ADCDAT1, 35 LRCK1, 36 BCLK1, 37 MCLK, 38 SCL, 39 SDA, 40 GPIO1/IRQ, 41 GPIO2/DMIC_SCL, 42 DCVDD, 43 DBVDD, 44 LDO1_EN, 45 SPO_RP, 46 SPKVDDR, 47 SPO_RN, 48 SPO_LN, 49 GND

## ALS-PT19-315C/L177/TR8
designator LED?
SENSOR PHOTO 630NM 2SMD; Manufacturer: Everlight; Manufacturer Part Number: ALS-PT19-315C/L177/TR8; Rise Time: 0.11ms; Fall Time: 0.22ms; Lens Style: Flat; Collector Emitter Breakdown Voltage: 5.5V; Polarity: NPN; Number of Elements: 1; Dark Current: 100nA; Item Type: Photo Sensor; Supplier 1: Digi-Key; RoHS: Yes; Category: Sensors; Stock 1: 41849; Pricing 1: 1=0.46000, 5=0.41800, 10=0.37100, 25=0.33200, 50=0.29180, 100=0.24880, 500=0.20576, 1000=0.17226 (USD); Mount: Surface Mount; Case/Package: SMD/SMT; Number of Pins: 2; Min Operating Temperature: -40°C; Max Operating Temperature: 85°C; Wavelength: 630nm; Packaging: Tape and Reel; Package Quantity: 1; Max Breakdown Voltage: 5.5V; Radiation Hardening: No; RoHS Compliant: Yes; ComponentLink1URL: https://datasheet.ciiva.com/12092/als-pt19-315c-l177-tr-datasheet-34741-12092024.pdf?src-supplier=Mouser; ComponentLink1Description: https://datasheet.ciiva.com/12092/als-pt19-315c-l177-tr-datasheet-34741-12092024.pdf?src-supplier=Mouser; ComponentLink2URL: https://datasheet.ciiva.com/4270/alspt19315cl177-tr8-1810-4270796.pdf?src-supplier=Arrow+Electronics; ComponentLink2Description: https://datasheet.ciiva.com/4270/alspt19315cl177-tr8-1810-4270796.pdf?src-supplier=Arrow+Electronics; Supplier Part Number 1: 1080-1244-1-ND; LCSC Part Number: C146233
footprint ALS-PT19-315C/L177/TR_
pins: 1 C, 2 E

## AMS1086CM-3.3
designator U?
72dB@(120Hz) 1.5A Fixed 3.3V~3.3V Positive 15V TO-263-3 Linear Voltage Regulators (LDO) ROHS; Manufacturer: Advanced Monolithic Systems; Manufacturer Part Number: AMS1086CM-3.3; Item Type: IC; Package: TO-263-3; LCSC Part Number: C27632; ComponentLink1Description: LCSC; ComponentLink1URL: https://www.lcsc.com/product-detail/Linear-Voltage-Regulators-LDO_Advanced-Monolithic-Systems-AMS1086CM-3-3_C27632.html
footprint TO263-3_
pins: 1 GND, 2 VOUT, 3 VIN, 4 VOUT

## AMS1117-3.3
designator U?
SOT-223 Linear Voltage Regulators (LDO) ROHS; Manufacturer: GUOXIN JIAPIN SEMICONDUCTOR; Manufacturer Part Number: AMS1117-3.3; Item Type: IC; Package: SOT-223; LCSC Part Number: C2992570; ComponentLink1Description: LCSC; ComponentLink1URL: https://www.lcsc.com/product-detail/Linear-Voltage-Regulators-LDO_GUOXIN-JIAPIN-SEMICONDUCTOR-AMS1117-3-3_C2992570.html
footprint SOT- 223
pins: 1 GND, 2 VOUT, 3 VIN, 4 VOUT

## AMS1117-5.0
designator U?
SOT-223 Linear Voltage Regulators (LDO) ROHS; Manufacturer: HX(hengjiaxing); Manufacturer Part Number: AMS1117-5.0; Item Type: IC; Package: SOT-223; LCSC Part Number: C5181462; ComponentLink1Description: LCSC; ComponentLink1URL: https://www.lcsc.com/product-detail/Linear-Voltage-Regulators-LDO_HX-hengjiaxing-AMS1117-5-0_C5181462.html
footprint SOT- 223
pins: 1 VSS/ADJ, 2 VOUT, 3 VIN, 4 VOUT

## Antenna
designator ANT?  (net tie)
footprint ANT*
pins: ANT# 1, GND 2

## AO3400A
designator Q?
30V 5.8A 32mΩ@10V,5.8A 1.4W 1.4V@250uA N Channel SOT-23 MOSFETs ROHS; Manufacturer: BORN; Manufacturer Part Number: AO3400A; Item Type: Mosfet; ComponentLink1Description: LCSC; ComponentLink1URL: https://www.lcsc.com/product-detail/MOSFETs_BORN-AO3400A_C344010.html; Footprint: SOT-23; LCSC Part Number: C344010
footprint sot-23
pins: 1 G, 2 S, 3 D